# Altium schematic symbol library Switches.SchLib: 43 symbols
Pins are listed as number, name and electrical type; pins without a type are passive.

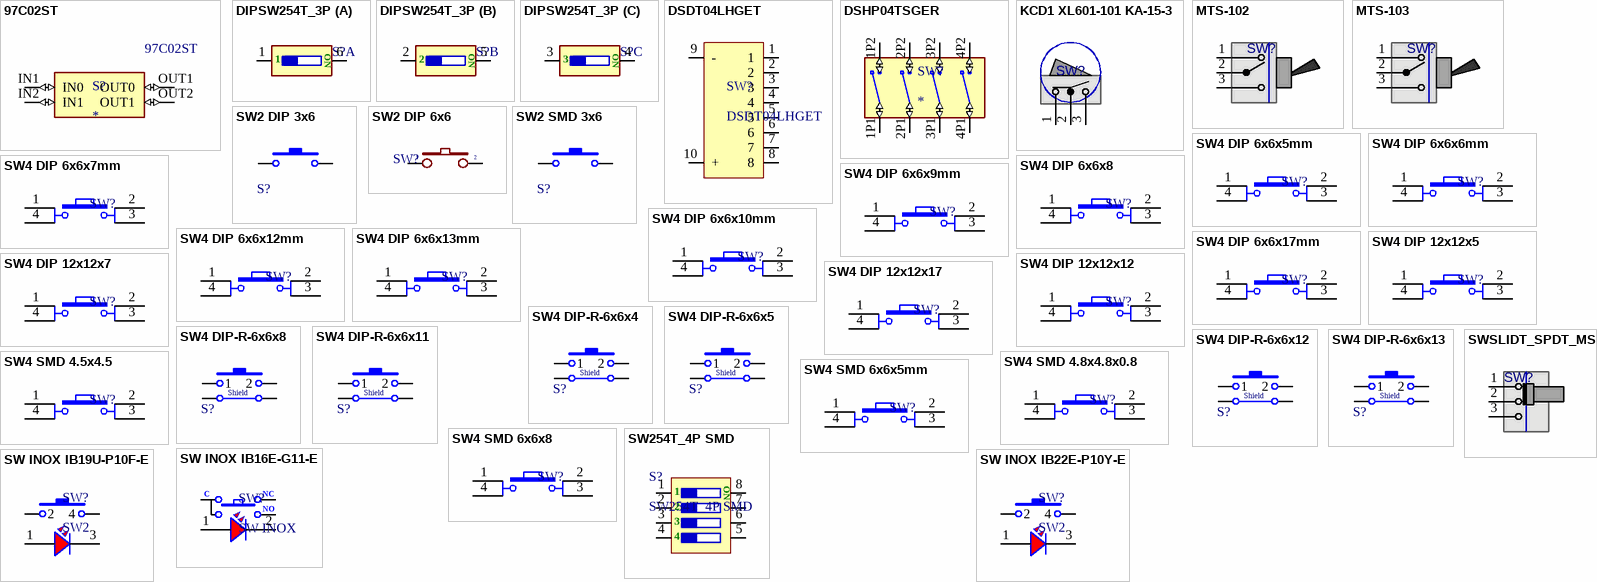
[diagram p0: symbols 97C02ST to SWSLIDT_SPDT_MSS3]

## 97C02ST
designator S?
Dip Switch SPST 2 Position Surface Mount Slide (Standard) Actuator 25mA 24VDC; MP: 97C02ST; MF: Grayhill Inc.; Purchase-URL: https://pricing.snapeda.com/search/part/97C02ST/?ref=eda; Package: None; SnapEDA_Link: https://www.snapeda.com/parts/97C02ST/Grayhill+Inc./view-part/?ref=snap; Value: *; Availability: In Stock; Price: None; Check_prices: https://www.snapeda.com/parts/97C02ST/Grayhill+Inc./view-part/?ref=eda
footprint 97C02ST
pins: IN1 IN0 (io), IN2 IN1 (io), OUT1 OUT0 (io), OUT2 OUT1 (io)

## DIPSW254T_3P
designator S?  (value not drawn)
SWITCH, DIP, 3P, THD; Code: 3601-010; Designed by: TranLuyen
footprint DIPSW254T_3 (SWITCH DIP 3POS, THD, 2.54mm, SD03)
footprint DIPSW254S_3 (SWITCH DIP 3POS, THD, 2.54mm, SD03)
part A pins: 1 A1, 6 B1
part B pins: 2 A2, 5 B2
part C pins: 3 A3, 4 B3
part A text: ON
part B text: ON
part C text: ON

## DSDT04LHGET
designator SW?
switch DSDT04LHGET 8bit 3 state; Code: 3601-017
footprint DSDT04LHGET (8 bit 3 state)
pins: 1, 2, 3, 4, 5, 6, 7, 8, 9 -, 10 +

## DSHP04TSGER
designator SW?
Switch DIP ON OFF SPST 4 Recessed Slide 0.025A 24VDC Gull Wing 1000Cycles 1.27mm SMD T/R; MP: DSHP04TSGER; MF: KINGTEK INDUSTRIAL; Package: None; Check_prices: https://www.snapeda.com/parts/DSHP04TSGER/GTE/view-part/?ref=eda; SnapEDA_Link: https://www.snapeda.com/parts/DSHP04TSGER/GTE/view-part/?ref=snap; Availability: In Stock; Price: None; Value: *
footprint DSHP04TSGER
pins: 1P1 (io), 1P2 (io), 2P1 (io), 2P2 (io), 3P1 (io), 3P2 (io), 4P1 (io), 4P2 (io)

## KCD1 XL601-101 KA-15-3
designator SW?  (value not drawn)
SWITCH,  THD, KA-15-3 15*21 , KCD1, XL601-101; Code: 3612-024; Designed by: Nhox
footprint KA-15-3 (21x15mm)
pins: 1 T1, 2 COM, 3 T2

## MTS-102
designator SW?, comment SWTG-102  (value not drawn)
SWITCH, TOGGLE, SPDT, THD; Code: N/A
footprint MTS-103 (12.7 x 6.6 x 5mm)
pins: 1 T1, 2 COM, 3 T2

## MTS-103
designator SW?, comment SWTG-103  (value not drawn)
SWITCH, TOGGLE, SPDT, THD; Code: 3604-005
footprint MTS-103 (12.7 x 6.6 x 5mm)
pins: 1 T1, 2 COM, 3 T2

## SW2 DIP 3x6
designator S?, comment SW-DIP  (value not drawn)
Button 3x6 mm x 5mm 2Pin DIP; Code: 3603-001
footprint SW DIP- 3x6 mm (Switch DIP type)
pins: 1, 2

## SW2 DIP 6x6
designator SW?, comment BT2  (value not drawn)
Switch button 2 pin; Code: 3610-014
footprint Button 2 Vuong 5mm (SW button 2pin, 250x 250 mil)
footprint BUTTON_2_Tron
pins: 1, 2

## SW2 SMD 3x6
designator S?, comment SW-SMD  (value not drawn)
Button 3x6 mm x 2.5mm 2Pin SMD; Code: 3606-006
footprint SW-SMD 3x6 mm (Switch SMD type)
pins: 1, 2

## SW4 DIP 6x6x5mm
designator SW?, comment BT4  (value not drawn)
Switch button 4 pin 6x6x5mm DIP; Code: 3610-003
footprint SW4 (SW button 4pin, 250 x250 mil)
pins: 1, 2, 3, 4

## SW4 DIP 6x6x6mm
designator SW?, comment BT4  (value not drawn)
Switch button 4 pin 6x6x5mm DIP; Code: 3610-097
footprint SW4-DIP 6x6x6 (SW button 4pin, 250 x250 mil)
pins: 1, 2, 3, 4

## SW4 DIP 6x6x7mm
designator SW?, comment BT4  (value not drawn)
Switch button 4 pin 6x6mm DIP; Code: 3610-005
footprint SW4-DIP 6x6x7 (SW button 4pin, 250 x250 mil)
pins: 1, 2, 3, 4

## SW4 DIP 6x6x8
designator SW?, comment BT4  (value not drawn)
Switch button 4 pin 6x6 mm DIP; Code: 3610-006; Designed by: TranLuyen
footprint SW4-DIP 6x6x8 (SW button 4pin, 250 x250 mil)
pins: 1, 2, 3, 4

## SW4 DIP 6x6x9mm
designator SW?, comment BT4  (value not drawn)
Switch button 4 pin 6x6x9mm DIP; Code: 3605-002; Designed by: Nhox
footprint SW4-DIP 6x6x9 (SW button 4pin, 250 x250 mil)
pins: 1, 2, 3, 4

## SW4 DIP 6x6x10mm
designator SW?, comment BT4  (value not drawn)
Switch button 4 pin 6x6 DIP; Code: 3610-008
footprint SW4-DIP 6x6x10mm (SW button 4pin, 250 x250 mil)
pins: 1, 2, 3, 4

## SW4 DIP 6x6x12mm
designator SW?, comment BT4  (value not drawn)
Switch button 4 pin 6x6 mm DIP; Code: 3610-009; Designed by: TranLuyen
footprint SW4-DIP 6x6x12 (SW button 4pin, 250 x250 mil)
pins: 1, 2, 3, 4

## SW4 DIP 6x6x13mm
designator SW?, comment BT4  (value not drawn)
Switch button 4 pin 6x6x13mm DIP; Code: 3610-090; Designed by: Nhox
footprint SW4-DIP 6x6x13 (SW button 4pin, 250 x250 mil)
pins: 1, 2, 3, 4

## SW4 DIP 6x6x17mm
designator SW?, comment BT4  (value not drawn)
Switch button 4 pin 6x6 DIP; Code: 3610-083
footprint SW4-DIP 6x6x17 (SW button 4pin, 250 x250 mil)
pins: 1, 2, 3, 4

## SW4 DIP 12x12x5
designator SW?, comment SW4  (value not drawn)
Switch button 4 pin 12x12x5mm DIP; Code: 3610-081
footprint TSW DIP-12*12*5 (12*12*5mm)
pins: 1, 2, 3, 4

## SW4 DIP 12x12x7
designator SW?, comment SW4  (value not drawn)
Switch button 4 pin 12x12x7mm DIP; Code: M-3610-032
footprint TSW DIP-12*12*7 (12*12*7mm)
pins: 1, 2, 3, 4

## SW4 DIP 12x12x12
designator SW?, comment SW4  (value not drawn)
Switch button 4 pin 12x12x12mm DIP; Code: N/A
footprint TSW DIP-12*12*12 (12*12*12mm)
pins: 1, 2, 3, 4

## SW4 DIP 12x12x17
designator SW?, comment SW4  (value not drawn)
Switch button 4 pin 12x12 DIP; Code: N/A
footprint TSW DIP-12*12*17 (12*12*17mm)
pins: 1, 2, 3, 4

## SW4 DIP-R-6x6x4
designator S?, comment SW4-R  (value not drawn)
SWITCH, PUSH BUTTON, TACTILE, THD, SPST, 6X6X mm RIGHT; Code: N/A
footprint SW4-R-6X6X4 (SWITCH, PUSHBUTTON, THD, SPST, 6X6X3.85 mm; 1,000,000 cycles ; 0.98N Force, SKHHLMA010)
pins: 1, 2, G1, G2
text: Shield

## SW4 DIP-R-6x6x5
designator S?, comment SW4-R  (value not drawn)
SWITCH, PUSH BUTTON, TACTILE, THD, SPST, 6X6X5 mm RIGHT; Code: N/A
footprint SW4-R-6X6X4 (SWITCH, PUSHBUTTON, THD, SPST, 6X6X3.85 mm; 1,000,000 cycles ; 0.98N Force, SKHHLMA010)
pins: 1, 2, G1, G2
text: Shield

## SW4 DIP-R-6x6x8
designator S?, comment SW4-R  (value not drawn)
SWITCH, PUSH BUTTON, TACTILE, THD, SPST, 6X6X8 mm RIGHT; Code: 3610-079
footprint SW4-R-6X6X8 (SWITCH, PUSHBUTTON, THD, SPST, 6X6X8mm; 1,000,000 cycles ; 0.98N Force, SKHHLUA010)
pins: 1, 2, G1, G2
text: Shield

## SW4 DIP-R-6x6x11
designator S?, comment SW4-R  (value not drawn)
SWITCH, PUSH BUTTON, TACTILE, THD, SPST, 6X6X mm RIGHT; Code: 3610-077
footprint SW4-R-6X6X11 (SWITCH, PUSHBUTTON, THD, SPST, 6X6mm, RIGHT ANGLE)
pins: 1, 2, G1, G2
text: Shield

## SW4 DIP-R-6x6x12
designator S?, comment SW4-R  (value not drawn)
SWITCH, PUSH BUTTON, TACTILE, THD, SPST, 6X6X mm RIGHT; Code: 3610-077
footprint SW4-R-6X6X12 (SWITCH, PUSHBUTTON, THD, SPST, 6X6mm, RIGHT ANGLE)
pins: 1, 2, G1, G2
text: Shield

## SW4 DIP-R-6x6x13
designator S?, comment SW4-R  (value not drawn)
SWITCH, PUSH BUTTON, TACTILE, THD, SPST, 6X6X mm RIGHT; Code: N/A
footprint SW4-R-6X6X13 (SWITCH, PUSHBUTTON, THD, SPST, 6X6mm, RIGHT ANGLE)
pins: 1, 2, G1, G2
text: Shield

## SW4 SMD 4.5x4.5
designator SW?, comment SW4  (value not drawn)
Switch button smd 4 pin 4.5x4.5x3.8mm; Code: 3607-003; Designed by: TranLuyen
footprint SW-SMD 4.5x4.5x3.8 (Switch SMD type)
pins: 1, 2, 3, 4

## SW4 SMD 4.8x4.8x0.8
designator SW?, comment SW4  (value not drawn)
Switch button smd 4 pin 4.8x4.8x0.8mm; Code: 3607-001
footprint SW-SMD 4.8x4.8x0.8 (Switch SMD type)
pins: 1, 2, 3, 4

## SW4 SMD 6x6x5mm
designator SW?, comment BT4  (value not drawn)
Switch button 4 pin 6x6x5mm DIP; Code: 3607-004; Designed by: TranLuyen
footprint SW4-SMD 6x6x5mm (Switch SMD type)
pins: 1, 2, 3, 4

## SW4 SMD 6x6x8
designator SW?, comment BT4  (value not drawn)
Switch button 4 pin 6x6x5mm DIP; Designed by: TranLuyen
footprint SW4-SMD 6x6x8 (Switch SMD type)
pins: 1, 2, 3, 4

## SW254T_4P SMD
designator S?
SWITCH, 4P, SMD; Designed by: Nhox; Code: N/A
footprint DIPSW254S_4 (SWITCH DIP 4POS, SMD, 2.54mm, CTS-219-04)
pins: 1 A1, 2, 3, 4, 5, 6, 7, 8
text: ON

## SW INOX IB16E-G11-E
designator SW?, comment SW INOX
IB22E-P10Y-E; Code: 12000-124; Designed by: TranLuyen
footprint SW IB16E-G11-E
pins: 1 A, 2 K, COM, NC, NO
text: C

## SW INOX IB19U-P10F-E
designator SW?, comment SW2
IB19U-P10F-E; Code: 3610-013; Designed by: TranLuyen
footprint SW IB19U-P10F-E
pins: 1 A, 2, 3 K, 4

## SW INOX IB22E-P10Y-E
designator SW?, comment SW2
IB22E-P10Y-E; Designed by: TranLuyen; Code: N/A
footprint SW IB22E-P10Y-E
pins: 1 A, 2, 3 K, 4

## SWSLIDT_SPDT_MSS3
designator SW?, comment MSS3-V  (value not drawn)
SWITCH, SLIDE, SPDT, SMD 24VDC/25mA / MSK-12C02; Designed by: TranLuyen; Code: N/A
footprint SWSLIDT_SPDT_MSS3 (Switch, Slide, SPDT,)
pins: 1 NC, 2 COM, 3 NO

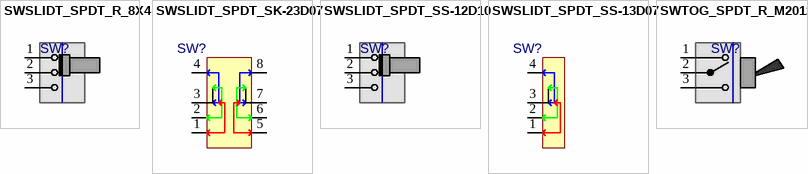
[diagram p1: symbols SWSLIDT_SPDT_R_8X4 to SWTOG_SPDT_R_M2012]

## SWSLIDT_SPDT_R_8X4
designator SW?, comment SWSL-R  (value not drawn)
SWITCH, SLIDE, SPDT, 8X4mm, THD SS-12D07VG4, MHSS1105; Designed by: TranLuyen; Code: N/A
footprint SWSLIDT_SPDT_R_8X4M (Subminiator SPDT switch)
pins: 1 P1, 2 P3, 3 P4

## SWSLIDT_SPDT_SK-23D07
designator SW?, comment 23D07  (value not drawn)
SWITCH, SLIDE, SPDT, SK-23D07; Designed by: Nhox; Code: N/A
footprint SK-23D07
pins: 1 NC, 2 COM, 3 NO, 4, 5, 6, 7, 8

## SWSLIDT_SPDT_SS-12D10
designator SW?, comment SS-12D10  (value not drawn)
SWITCH, SLIDE, SPDT,12.7x6.6x5mm, THD SS-12D10; Designed by: Nhox; Code: N/A
footprint SS-12D10 (12.7 x 6.6 x 5mm)
pins: 1 P1, 2 P3, 3 P4

## SWSLIDT_SPDT_SS-13D07
designator SW?, comment 13D07  (value not drawn)
SWITCH, SLIDE, SPDT, SS-13D07; Designed by: Nhox; Code: N/A
footprint SS-13D07
pins: 1 NC, 2 COM, 3 NO, 4

## SWTOG_SPDT_R_M2012
designator SW?, comment SWTG-R-102  (value not drawn)
SWITCH, TOGGLE, SPDT, THD; Designed by: TranLuyen; Code: N/A
footprint SWTOG_SPDT_R_M2012 (Switch Toggle, SPDT, THD, RightAngLe, NKK M2012SA2W30, MTS-102-C3)
pins: 1 T1, 2 COM, 3 T2